# Altium schematic symbol library 3bridglib.SchLib: 1 symbol
Pins are listed as number, name and electrical type; pins without a type are passive.

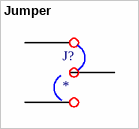
[diagram p0: symbol Jumper]

## Jumper
designator J?
footprint Edge Connector
pins: TP 3, TP 4, TP 5